# Altium footprint library 2020-05-05_08-19-02.PcbLib: 1 footprints
Each footprint in its own frame and in the unit in brackets; x right, y up, seen from the top. Pads: shape width x height; smd on the part's side, far side on the other; paste and mask are expansions set on the pad; w line width, h text height; cw(c..) or ccw(c..) is an arc to the next point about the centre after c.
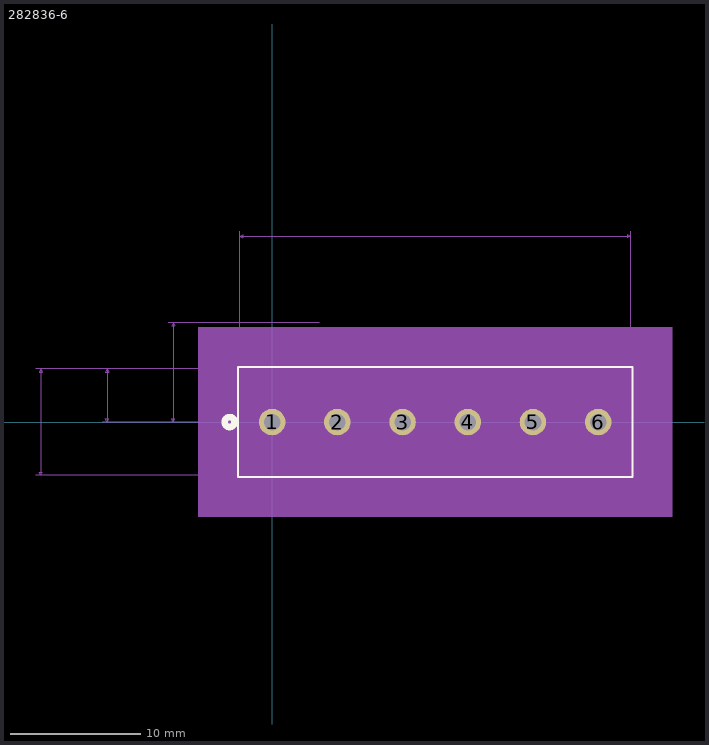
[diagram p0: the footprint, top view; thin cyan lines are the x and y axes]

## 282836-6 [mil]
pads (6):
  round 80 hole 50: 1(0,0) 2(196.85,0) 3(393.7,0) 4(590.55,0) 5(787.4,0) 6(984.25,0)
Top Overlay:
  circle w20: c-128.37,0 r15
  lines w6: -103.37,-166 1087.63,-166 1087.63,166 -103.37,166 -103.37,-166
Bottom Overlay:
  circle w20: c-128.37,0 r15
Mechanical 5:
  region: -223.37,286 1207.63,286 1207.63,-286 -223.37,-286
Mechanical 7:
  lines w1: -713.37,-161 -98.37,-161 ; -713.37,161 -98.37,161 ; -513.37,0 492.13,0 ; -513.37,161 -98.37,161 ; -313.37,0 492.13,0 ; -313.37,300 142.13,300 ; -213.37,-100 42.13,-100 ; -213.37,0 492.13,0 ; -198.37,-150 -198.37,-100 ; -198.37,50 -198.37,0 ; -98.37,576 -98.37,161 ; 0,0 0,276 ; 196.85,0 196.85,276 ; 1082.63,161 1082.63,576 ; 1182.63,-50 1182.63,0 ; 1182.63,50 1182.63,0 ; -698.37,-161 -698.37,161 ; -698.37,-161 -703.37,-151 -693.37,-151 -698.37,-161 ; -698.37,161 -703.37,151 -693.37,151 -698.37,161 ; -498.37,0 -498.37,161 ; -498.37,0 -503.37,10 -493.37,10 -498.37,0 ; -498.37,161 -503.37,151 -493.37,151 -498.37,161 ; -298.37,0 -298.37,300 ; -298.37,0 -303.37,10 -293.37,10 -298.37,0 ; -298.37,300 -303.37,290 -293.37,290 -298.37,300 ; -198.37,-100 -203.37,-110 -193.37,-110 -198.37,-100 ; -198.37,0 -203.37,10 -193.37,10 -198.37,0 ; -98.37,561 1082.63,561 ; -98.37,561 -88.37,566 -88.37,556 -98.37,561 ; 0,261 196.85,261 ; 0,261 10,266 10,256 0,261 ; 196.85,261 186.85,266 186.85,256 196.85,261 ; 1082.63,561 1072.63,566 1072.63,556 1082.63,561 ; 1182.63,0 1177.63,10 1187.63,10 1182.63,0 ; 1182.63,0 1177.63,-10 1187.63,-10 1182.63,0 ; 984.25,0 1197.63,0 984.25,0
  text "Default Padstyle: EX80Y80D50P" at 129.63,-311 h50
  text "1st Mtg Padstyle: RX80Y80D50P" at 129.63,-386 h50
  text "2nd Mtg Padstyle: EX70Y70D70P" at 129.63,-461 h50
  text "3rd Mtg Padstyle: EX70Y70D70P" at 129.63,-536 h50
  text "Left Mtg Padstyle: EX60Y60D30P" at 117.13,-611 h50
  text "Right Mtg Padstyle: EX60Y60D30P" at 104.63,-686 h50
  text "Alt Padstyle 1: OX60Y90D30P" at 154.63,-761 h50
  text "Alt Padstyle 2: OX90Y60D30P" at 154.63,-836 h50
  text "0.1968504in/5mm" at 4.68,281 h25
  text "1.181in/29.997mm" at 392.13,581 h25
  text "0in/0mm" at 1202.63,-12.5 h25
  text "0in/0mm" at -305.87,-62.5 h25
  text "0.3in/7.62mm" at -468.37,137.5 h25
  text "0.161in/4.089mm" at -705.87,68 h25
  text "0.322in/8.179mm" at -905.87,-12.5 h25
Mechanical 13:
  circle w20: c0,75 r15
  lines w1: -98.37,-161 1082.63,-161 1082.63,161 -98.37,161 -98.37,-161
Mechanical 15:
  region: 1092.63,171 -108.37,171 -108.37,-171 1092.63,-171
  lines w6: -108.37,-171 -108.37,171 1092.63,171 1092.63,-171 -108.37,-171
3D body: height 10, standoff 0, extent 0,0 10,10